# Altium footprint library PMP23468.PcbLib: 24 footprints (part 2 of 2)
Each footprint in its own frame and in the unit in brackets; x right, y up, seen from the top. Pads: shape width x height; smd on the part's side, far side on the other; paste and mask are expansions set on the pad; w line width, h text height; cw(c..) or ccw(c..) is an arc to the next point about the centre after c.
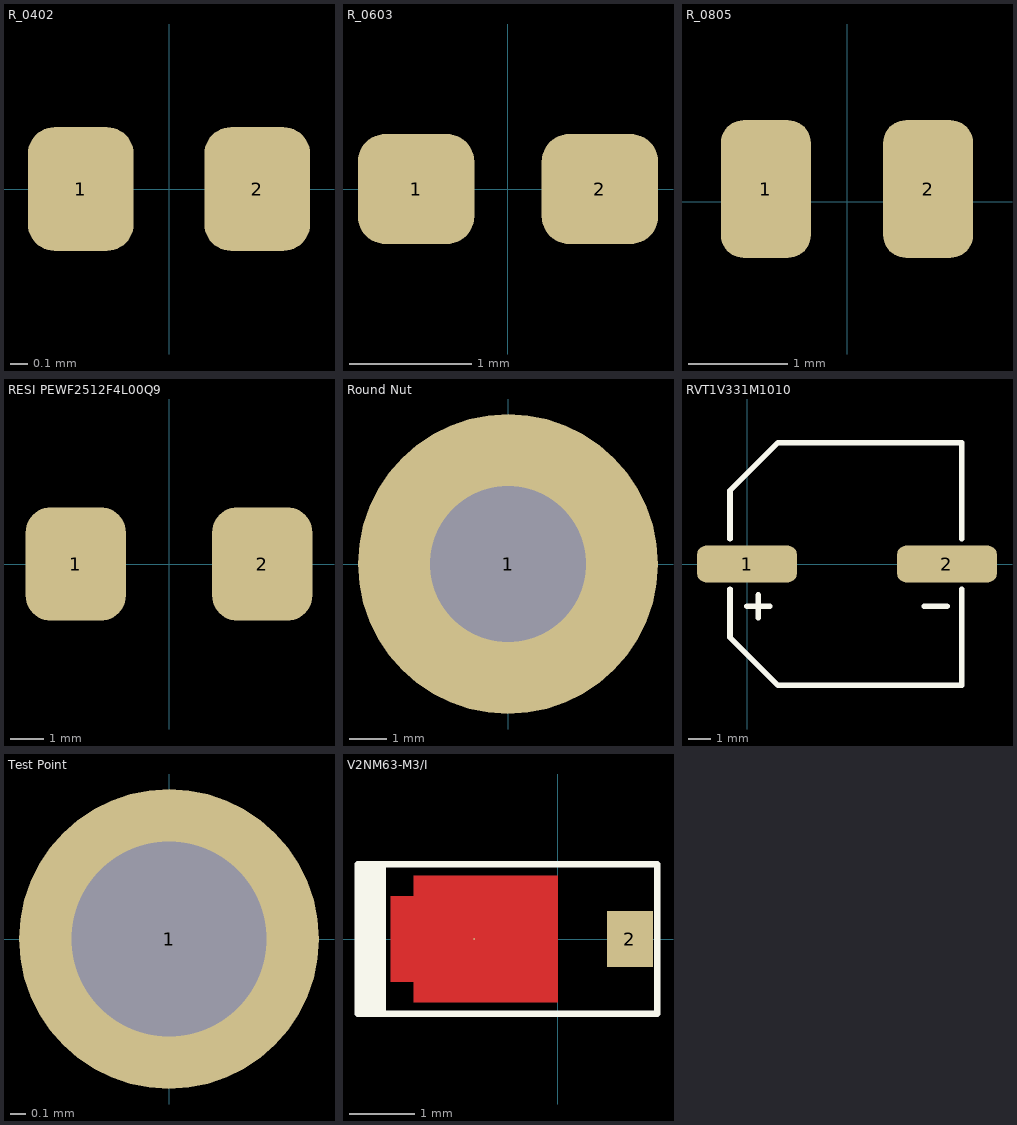
[diagram p1: the footprints below, top view; thin cyan lines are the x and y axes]

## R_0402 [mm]
pads (2):
  rrect50% 0.6x0.7 smd mask+0.102: 1(-0.5,0) 2(0.5,0)
3D body "Resistor_0402_Text.step": height 0.37, standoff 0.01, extent -0.508,-0.254 0.508,0.254

## R_0603 [mm]
pads (2):
  rrect50% 0.95x0.9 smd mask+0.102: 1(-0.75,0) 2(0.75,0)
3D body "Resistor_0603_Text.step": height 0.47, standoff 0.01, extent -0.8,-0.4 0.8,0.4

## R_0805 [mm]
pads (2):
  rrect50% 0.91x1.39 smd: 1(-0.82,0.127) 2(0.82,0.127)

## RESI PEWF2512F4L00Q9 [mm] "3W 4mΩ Surface Mount Shunt ±50ppm/℃ ±1% 2512 Current Sense Resistors / Shunt Resistors ROHS"
pads (2):
  rrect50% 3x3.4 smd: 1(-2.794,0) 2(2.794,0)

## Round Nut [mm]
pads (1):
  round 8 hole 4.15 mask+0.5: 1(0,0)

## RVT1V331M1010 [mm]
pads (2):
  rrect50% 4.5x1.65 smd: 1(0,0) 2(9,0)
Top Overlay:
  lines w0.254: -0.762,-1.143 -0.762,-3.302 -0.758,-3.302 1.401,-5.461 9.656,-5.461 9.656,-1.143 ; -0.762,1.143 -0.762,3.302 -0.758,3.302 1.401,5.461 9.656,5.461 9.656,1.143 ; 0,-1.905 1.016,-1.905 ; 0.508,-2.413 0.508,-1.397 ; 7.984,-1.905 9,-1.905
Mechanical 1:
3D body "Capacitor Aluminium.stp": height 12.1, standoff 0, extent -2.25,-5.46 11.25,5.46

## Test Point [mm] "RH-5000"
pads (1):
  round 2 hole 1.3: 1(0,0)

## V2NM63-M3/I [mm]
pads (2):
  round 0.025 smd mask+0: 1(-1.275,0)
  rect 0.7x0.86 smd: 2(1.104,0)
Top Layer:
  region: -2.55,-0.65 -2.55,0.65 -2.2,0.65 -2.2,0.965 0,0.965 0,-0.965 -2.2,-0.965 -2.2,-0.65
Top Overlay:
  rectangle: -3.048,-1.143 -2.667,1.143
  lines w0.1: -2.667,-1.143 -2.667,1.143 ; -2.667,-1.143 1.524,-1.143 1.524,0 1.524,1.143 -2.667,1.143 ; -2.667,-1.143 -3.048,-1.143 -3.048,1.143 -2.667,1.143